# Altium schematic symbol library RELAY,DPDT,5V,IM03GR.Schlib: 1 symbol
Pins are listed as number, name and electrical type; pins without a type are passive.

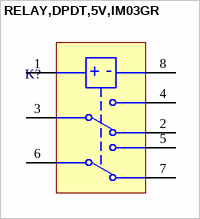
[diagram p0: symbol RELAY,DPDT,5V,IM03GR]

## RELAY,DPDT,5V,IM03GR
designator K?
pins: 1 COILP, 2 NC, 3 C, 4 NO, 5 NO, 6 C, 7 NC, 8 COILN
text: +; -